# Altium footprint library FootPrintLib_3.PcbLib: 198 footprints (part 10 of 13)
Each footprint in its own frame and in the unit in brackets; x right, y up, seen from the top. Pads: shape width x height; smd on the part's side, far side on the other; paste and mask are expansions set on the pad; w line width, h text height; cw(c..) or ccw(c..) is an arc to the next point about the centre after c.
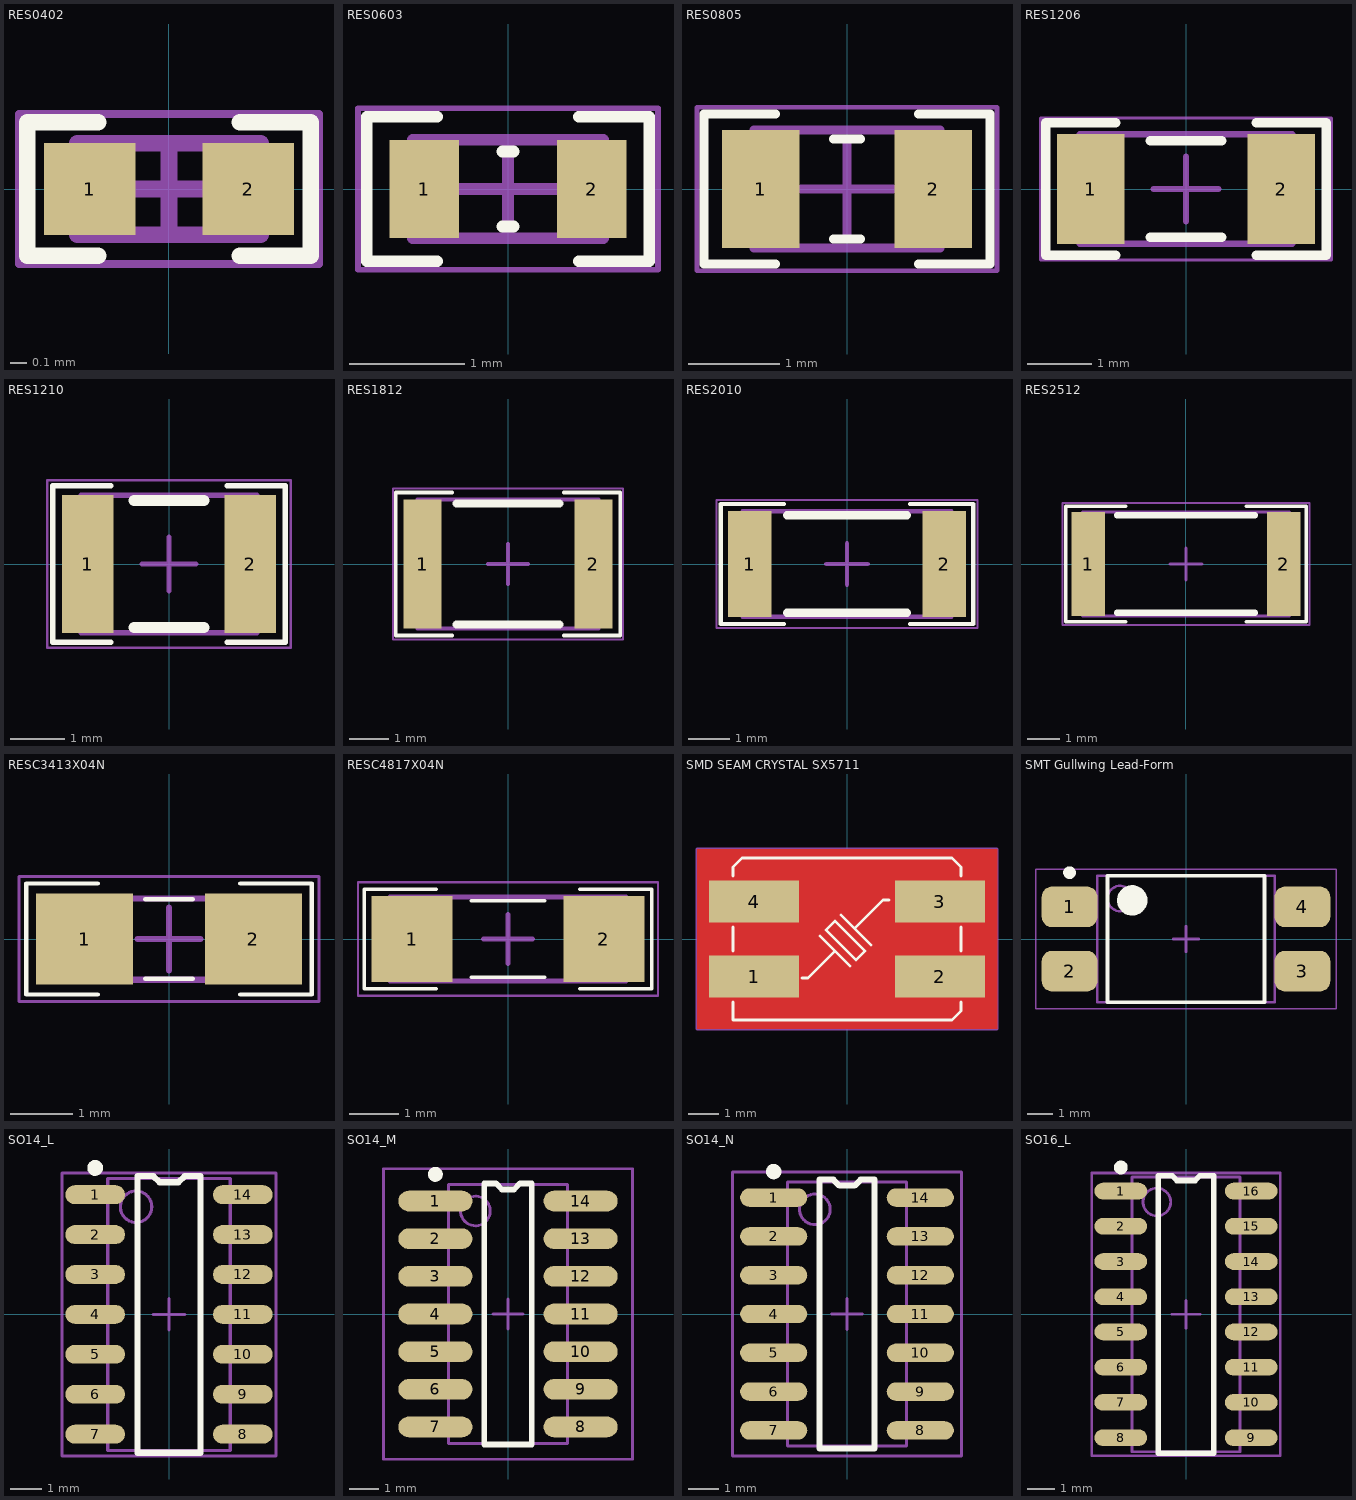
[diagram p9: the footprints below, top view; thin cyan lines are the x and y axes]

## RES0402 [mm] "Chip Resistor, 2-Leads, Body 1/00x0/50mm, IPC Medium Density DESIGNER:ABBAS BASEREH"
height 0.32
pads (2):
  rect 0.55x0.55 smd mask+0.06: 1(-0.475,0) 2(0.475,0)
Top Overlay:
  lines w0.1: -0.425,-0.4 -0.85,-0.4 -0.85,0.4 -0.425,0.4 ; 0.425,-0.4 0.85,-0.4 0.85,0.4 0.425,0.4
Mechanical 13:
  lines w0.1: -0.55,-0.275 -0.55,0.275 0.55,0.275 0.55,-0.275 -0.55,-0.275
Mechanical 15:
  lines w0.05: -0.9,-0.45 -0.9,0.45 0.9,0.45 0.9,-0.45 -0.9,-0.45
  lines w0.1: -0.275,0 0.275,0 ; 0,-0.275 0,0.275
3D body "RES0402.step": height 0.32, standoff 0, extent -0.55,-0.275 0.55,0.275

## RES0603 [mm] "Chip Resistor, 2-Leads, Body 1/60x0/80mm, IPC Medium Density DESIGNER:ABBAS BASEREH"
height 0.4
pads (2):
  rect 0.6x0.85 smd: 1(-0.725,0) 2(0.725,0)
Top Overlay:
  lines w0.1: -0.613,-0.625 -1.225,-0.625 -1.225,0.625 -0.613,0.625 ; -0.05,-0.325 0.05,-0.325 ; -0.05,0.325 0.05,0.325 ; 0.613,-0.625 1.225,-0.625 1.225,0.625 0.613,0.625
Mechanical 13:
  lines w0.1: -0.825,-0.425 -0.825,0.425 0.825,0.425 0.825,-0.425 -0.825,-0.425
Mechanical 15:
  lines w0.05: -1.3,-0.7 -1.3,0.7 1.3,0.7 1.3,-0.7 -1.3,-0.7
  lines w0.1: -0.425,0 0.425,0 ; 0,-0.425 0,0.425
3D body "RES0603.step": height 0.4, standoff 0, extent -0.825,-0.425 0.825,0.425

## RES0805 [mm] "Chip Resistor, 2-Leads, Body 2/00x1/25mm, IPC Medium Density DESIGNER:ABBAS BASEREH"
height 0.5
pads (2):
  rect 0.85x1.3 smd: 1(-0.95,0) 2(0.95,0)
Top Overlay:
  lines w0.1: -0.788,-0.825 -1.575,-0.825 -1.575,0.825 -0.788,0.825 ; -0.15,-0.55 0.15,-0.55 ; -0.15,0.55 0.15,0.55 ; 0.788,-0.825 1.575,-0.825 1.575,0.825 0.788,0.825
Mechanical 13:
  lines w0.1: -1.025,-0.65 1.025,-0.65 1.025,0.65 -1.025,0.65 -1.025,-0.65
Mechanical 15:
  lines w0.05: -1.65,-0.9 1.65,-0.9 1.65,0.9 -1.65,0.9 -1.65,-0.9
  lines w0.1: -0.5,0 0.5,0 ; 0,-0.5 0,0.5
3D body "RES0805.step": height 0.5, standoff 0, extent -1.025,-0.65 1.025,0.65

## RES1206 [mm] "Chip Resistor, 2-Leads, Body 3/20x1/60mm, IPC Medium Density DESIGNER:ABBAS BASEREH"
height 0.94
pads (2):
  rect 1.05x1.7 smd: 1(-1.475,0) 2(1.475,0)
Top Overlay:
  lines w0.15: -1.088,-1.025 -2.175,-1.025 -2.175,1.025 -1.088,1.025 ; -0.55,-0.75 0.55,-0.75 ; -0.55,0.75 0.55,0.75 ; 1.088,-1.025 2.175,-1.025 2.175,1.025 1.088,1.025
Mechanical 13:
  lines w0.1: -1.65,-0.85 -1.65,0.85 1.65,0.85 1.65,-0.85 -1.65,-0.85
Mechanical 15:
  lines w0.05: -2.25,-1.1 -2.25,1.1 2.25,1.1 2.25,-1.1 -2.25,-1.1
  lines w0.1: -0.5,0 0.5,0 ; 0,-0.5 0,0.5
3D body "RES1206.step": height 0.94, standoff 0, extent -1.65,-0.85 1.65,0.85

## RES1210 [mm] "Chip Resistor, 2-Leads, Body 3/20x2/50mm, IPC Medium Density DESIGNER:ABBAS BASEREH"
height 0.55
pads (2):
  rect 0.95x2.55 smd: 1(-1.5,0) 2(1.5,0)
Top Overlay:
  lines w0.1: -1.075,-1.45 -2.15,-1.45 -2.15,1.45 -1.075,1.45 ; 1.075,-1.45 2.15,-1.45 2.15,1.45 1.075,1.45
  lines w0.2: -0.65,-1.175 0.65,-1.175 ; -0.65,1.175 0.65,1.175
Mechanical 13:
  lines w0.1: -1.625,-1.275 -1.625,1.275 1.625,1.275 1.625,-1.275 -1.625,-1.275
Mechanical 15:
  lines w0.05: -2.25,-1.55 -2.25,1.55 2.25,1.55 2.25,-1.55 -2.25,-1.55
  lines w0.1: -0.5,0 0.5,0 ; 0,-0.5 0,0.5
3D body "RES1210.step": height 0.55, standoff 0, extent -1.625,-1.275 1.625,1.275

## RES1812 [mm] "Chip Resistor, 2-Leads, Body 4/50x3/20mm, IPC Medium Density DESIGNER:ABBAS BASEREH"
height 0.55
pads (2):
  rect 0.95x3.25 smd: 1(-2.15,0) 2(2.15,0)
Top Overlay:
  lines w0.1: -1.413,-1.8 -2.825,-1.8 -2.825,1.8 -1.413,1.8 ; 1.413,-1.8 2.825,-1.8 2.825,1.8 1.413,1.8
  lines w0.2: -1.3,-1.525 1.3,-1.525 ; -1.3,1.525 1.3,1.525
Mechanical 13:
  lines w0.1: -2.275,-1.625 -2.275,1.625 2.275,1.625 2.275,-1.625 -2.275,-1.625
Mechanical 15:
  lines w0.05: -2.9,-1.9 -2.9,1.9 2.9,1.9 2.9,-1.9 -2.9,-1.9
  lines w0.1: -0.5,0 0.5,0 ; 0,-0.5 0,0.5
3D body "RES1812.step": height 0.55, standoff 0, extent -2.275,-1.625 2.275,1.625

## RES2010 [mm] "Chip Resistor, 2-Leads, Body 5/00x2/50mm, IPC Medium Density DESIGNER:ABBAS BASEREH"
height 0.55
pads (2):
  rect 1.05x2.55 smd: 1(-2.35,0) 2(2.35,0)
Top Overlay:
  lines w0.1: -1.525,-1.45 -3.05,-1.45 -3.05,1.45 -1.525,1.45 ; 1.525,-1.45 3.05,-1.45 3.05,1.45 1.525,1.45
  lines w0.2: -1.45,-1.175 1.45,-1.175 ; -1.45,1.175 1.45,1.175
Mechanical 13:
  lines w0.1: -2.525,-1.275 2.525,-1.275 2.525,1.275 -2.525,1.275 -2.525,-1.275
Mechanical 15:
  lines w0.05: -3.15,-1.55 3.15,-1.55 3.15,1.55 -3.15,1.55 -3.15,-1.55
  lines w0.1: -0.5,0 0.5,0 ; 0,-0.5 0,0.5
3D body "RES2010.step": height 0.55, standoff 0, extent -2.525,-1.275 2.525,1.275

## RES2512 [mm] "Chip Resistor, 2-Leads, Body 6/40x3/20mm, IPC Medium Density DESIGNER:ABBAS BASEREH"
height 0.7
pads (2):
  rect 1.05x3.25 smd: 1(-3.05,0) 2(3.05,0)
Top Overlay:
  lines w0.1: -1.875,-1.8 -3.75,-1.8 -3.75,1.8 -1.875,1.8 ; 1.875,-1.8 3.75,-1.8 3.75,1.8 1.875,1.8
  lines w0.2: -2.15,-1.525 2.15,-1.525 ; -2.15,1.525 2.15,1.525
Mechanical 13:
  lines w0.1: -3.225,-1.625 3.225,-1.625 3.225,1.625 -3.225,1.625 -3.225,-1.625
Mechanical 15:
  lines w0.05: -3.85,-1.9 3.85,-1.9 3.85,1.9 -3.85,1.9 -3.85,-1.9
  lines w0.1: -0.5,0 0.5,0 ; 0,-0.5 0,0.5
3D body "RES2512.step": height 0.7, standoff 0, extent -3.225,-1.625 3.225,1.625

## RESC3413X04N [mm] "Chip Resistor, 2-Leads, Body 3/40x1/30mm, IPC Medium Density-Design:Abbas Basereh"
height 0.4
pads (2):
  rect 1.55x1.45 smd: 1(-1.35,0) 2(1.35,0)
Top Overlay:
  lines w0.07: -1.143,-0.889 -2.286,-0.889 -2.286,0.889 -1.143,0.889 ; -0.381,-0.635 0.381,-0.635 ; -0.381,0.635 0.381,0.635 ; 1.143,-0.889 2.286,-0.889 2.286,0.889 1.143,0.889
Mechanical 13:
  lines w0.1: -1.7,-0.65 -1.7,0.65 1.7,0.65 1.7,-0.65 -1.7,-0.65
Mechanical 15:
  lines w0.05: -2.4,-1 -2.4,1 2.4,1 2.4,-1 -2.4,-1
  lines w0.1: -0.5,0 0.5,0 ; 0,-0.5 0,0.5
3D body "User Library-0805(2012M) Res.STEP": height 0.79, standoff 0, extent -1.254,-0.622 1.254,0.622

## RESC4817X04N [mm] "Chip Resistor, 2-Leads, Body 4/80x1/70mm, IPC Medium Density-Design:Abbas Basereh"
height 0.4
pads (2):
  rect 1.65x1.75 smd: 1(-1.95,0) 2(1.95,0)
Top Overlay:
  lines w0.07: -1.46,-1.016 -2.921,-1.016 -2.921,1.016 -1.46,1.016 ; -0.75,-0.775 0.75,-0.775 ; -0.75,0.775 0.75,0.775 ; 1.46,-1.016 2.921,-1.016 2.921,1.016 1.46,1.016
Mechanical 13:
  lines w0.1: -2.4,-0.85 -2.4,0.85 2.4,0.85 2.4,-0.85 -2.4,-0.85
Mechanical 15:
  lines w0.05: -3.05,-1.15 -3.05,1.15 3.05,1.15 3.05,-1.15 -3.05,-1.15
  lines w0.1: -0.5,0 0.5,0 ; 0,-0.5 0,0.5
3D body "SW3dPS-1206 SMD Resistor.STEP": height 1, standoff 0, extent -1.6,-0.8 1.6,0.8

## SMD SEAM CRYSTAL SX5711 [mm] "High frequency stability and reliability.DESIGNER ABBAS BASEREH"
height 1.2
pads (4):
  rect 3x1.4 smd: 1(-3.1,-1.25) 2(3.1,-1.25) 3(3.1,1.25) 4(-3.1,1.25)
Top Layer:
  pour cut-out: -5,3 -5,-3 5,-3 5,3
Top Overlay:
  lines w0.1: -3.8,-2.1 -3.8,-2.7 3.5,-2.7 3.8,-2.4 3.8,-2.1 ; -3.8,-0.4 -3.8,0.4 ; -3.8,2.1 -3.8,2.4 -3.5,2.7 3.5,2.7 3.8,2.4 3.8,2.1 ; -1.5,-1.3 -1.3,-1.3 -0.4,-0.4 ; -0.9,0.1 0.1,-0.9 ; -0.2,0.8 0.8,-0.2 ; 0.3,0.4 1.2,1.3 1.4,1.3 ; 3.8,-0.4 3.8,0.4 ; -0.7,0.3 0.3,-0.7 0.6,-0.4 ; -0.7,0.3 -0.7,0.3 ; -0.7,0.3 -0.4,0.6 0.6,-0.4 ; 0.6,-0.4 0.6,-0.4
Mechanical 15:
  lines w0.1: -0.5,0 0.5,0 ; 0,-0.5 0,0.5 ; -5,-3 -5,3 5,3 5,-3 -5,-3
3D body "User Library-KX-13 7_0x5_0x1_3.STEP": height 1.3, standoff 0, extent -3.525,-2.5 3.475,2.5

## SMT Gullwing Lead-Form [mm] "SOP, 4-Leads, Body 4/65x6/75mm, Pitch 2/54mm, IPC Medium Density designer:abbas basereh"
height 3.5
pads (4):
  rrect50% 2.2x1.6 smd mask+0.06: 1(-4.6,1.27) 2(-4.6,-1.27) 3(4.6,-1.27) 4(4.6,1.27)
Top Overlay:
  circle w0.6: c-2.125,1.525 r0.3
  circle w0.25: c-4.6,2.62 r0.125
  lines w0.15: -3.1,-2.5 3.1,-2.5 3.1,2.5 -3.1,2.5 -3.1,-2.5
Mechanical 13:
  circle w0.1: c-2.6,1.6 r0.5
  lines w0.1: -3.5,-2.5 3.5,-2.5 3.5,2.5 -3.5,2.5 -3.5,-2.5
Mechanical 15:
  lines w0.05: -5.925,-2.75 5.925,-2.75 5.925,2.75 -5.925,2.75 -5.925,-2.75
  lines w0.1: -0.5,0 0.5,0 ; 0,-0.5 0,0.5
3D body "User Library-PC817_Gullwing.STEP": height 3.89, standoff 0.04, extent -5,-2.29 5,2.29

## SO14_L [mm] "14-Pin Small Outline Integrated Circuit 1.27 mm Pitch, IPC High Density - Designer Abbas Basereh"
height 1.75
pads (14):
  oval 1.9x0.6 smd: 1(-2.35,3.81) 2(-2.35,2.54) 3(-2.35,1.27) 4(-2.35,0) 5(-2.35,-1.27) 6(-2.35,-2.54) 7(-2.35,-3.81) 8(2.35,-3.81) 9(2.35,-2.54) 10(2.35,-1.27) 11(2.35,0) 12(2.35,1.27) 13(2.35,2.54) 14(2.35,3.81)
Top Overlay:
  circle w0.25: c-2.35,4.66 r0.125
  lines w0.2: -1,-4.4 -1,4.4 -0.5,4.4 -0.3,4.2 0.3,4.2 0.5,4.4 1,4.4 1,-4.4 -1,-4.4
Mechanical 13:
  circle w0.1: c-1.05,3.425 r0.5
  lines w0.1: -1.95,-4.325 -1.95,4.325 1.95,4.325 1.95,-4.325 -1.95,-4.325
Mechanical 15:
  lines w0.1: -0.5,0 0.5,0 ; 0,-0.5 0,0.5 ; -3.4,-4.5 -3.4,4.5 3.4,4.5 3.4,-4.5 -3.4,-4.5
3D body "User Library-SO-14N.STEP": height 1.62, standoff 0, extent -3,-4.34 3,4.34

## SO14_M [mm] "14-Pin Small Outline Integrated Circuit 1.27 mm Pitch, IPC Low Density - Designer Abbas Basereh"
height 1.75
pads (14):
  oval 2.5x0.7 smd: 1(-2.45,3.81) 2(-2.45,2.54) 3(-2.45,1.27) 4(-2.45,0) 5(-2.45,-1.27) 6(-2.45,-2.54) 7(-2.45,-3.81) 8(2.45,-3.81) 9(2.45,-2.54) 10(2.45,-1.27) 11(2.45,0) 12(2.45,1.27) 13(2.45,2.54) 14(2.45,3.81)
Top Overlay:
  circle w0.25: c-2.45,4.71 r0.125
  lines w0.2: -0.8,-4.4 0.8,-4.4 0.8,4.4 0.4,4.4 0.2,4.2 -0.2,4.2 -0.4,4.4 -0.8,4.4 -0.8,-4.4
Mechanical 13:
  circle w0.1: c-1.1,3.475 r0.5
  lines w0.1: -2,-4.375 2,-4.375 2,4.375 -2,4.375 -2,-4.375
Mechanical 15:
  lines w0.1: -0.5,0 0.5,0 ; 0,-0.5 0,0.5 ; -4.2,-4.9 4.2,-4.9 4.2,4.9 -4.2,4.9 -4.2,-4.9
3D body "User Library-SO-14N.STEP": height 1.62, standoff 0, extent -3,-4.34 3,4.34

## SO14_N [mm] "14-Pin Small Outline Integrated Circuit 1.27 mm Pitch, IPC Medium Density - Designer Abbas Basereh"
height 1.75
pads (14):
  oval 2.2x0.6 smd: 1(-2.4,3.81) 2(-2.4,2.54) 3(-2.4,1.27) 4(-2.4,0) 5(-2.4,-1.27) 6(-2.4,-2.54) 7(-2.4,-3.81) 8(2.4,-3.81) 9(2.4,-2.54) 10(2.4,-1.27) 11(2.4,0) 12(2.4,1.27) 13(2.4,2.54) 14(2.4,3.81)
Top Overlay:
  circle w0.25: c-2.4,4.66 r0.125
  lines w0.2: -0.9,-4.4 -0.9,4.4 -0.45,4.4 -0.25,4.2 0.25,4.2 0.45,4.4 0.9,4.4 0.9,-4.4 -0.9,-4.4
Mechanical 13:
  circle w0.1: c-1.05,3.425 r0.5
  lines w0.1: -1.95,-4.325 -1.95,4.325 1.95,4.325 1.95,-4.325 -1.95,-4.325
Mechanical 15:
  lines w0.1: -0.5,0 0.5,0 ; 0,-0.5 0,0.5 ; -3.75,-4.65 -3.75,4.65 3.75,4.65 3.75,-4.65 -3.75,-4.65
3D body "User Library-SO-14N.STEP": height 1.62, standoff 0, extent -3,-4.34 3,4.34

## SO16_L [mm] "16-Pin Small Outline Integrated Circuit 1.27 mm Pitch, IPC High Density - DESIGNER ABBAS BASEREH"
height 1.75
pads (16):
  oval 1.9x0.6 smd: 1(-2.35,4.445) 2(-2.35,3.175) 3(-2.35,1.905) 4(-2.35,0.635) 5(-2.35,-0.635) 6(-2.35,-1.905) 7(-2.35,-3.175) 8(-2.35,-4.445) 9(2.35,-4.445) 10(2.35,-3.175) 11(2.35,-1.905) 12(2.35,-0.635) 13(2.35,0.635) 14(2.35,1.905) 15(2.35,3.175) 16(2.35,4.445)
Top Overlay:
  circle w0.25: c-2.35,5.295 r0.125
  lines w0.2: -1,-5 1,-5 1,5 0.5,5 0.326,4.826 -0.326,4.826 -0.5,5 -1,5 -1,-5
Mechanical 13:
  circle w0.1: c-1.05,4.05 r0.5
  lines w0.1: -1.95,-4.95 1.95,-4.95 1.95,4.95 -1.95,4.95 -1.95,-4.95
Mechanical 15:
  lines w0.1: -0.5,0 0.5,0 ; 0,-0.5 0,0.5 ; -3.4,-5.1 3.4,-5.1 3.4,5.1 -3.4,5.1 -3.4,-5.1
3D body "User Library-SO-16N.STEP": height 1.62, standoff 0, extent -3,-4.965 3,4.965